# Altium footprint library amirlib.PcbLib: 456 footprints (part 8 of 29)
Each footprint in its own frame and in the unit in brackets; x right, y up, seen from the top. Pads: shape width x height; smd on the part's side, far side on the other; paste and mask are expansions set on the pad; w line width, h text height; cw(c..) or ccw(c..) is an arc to the next point about the centre after c.
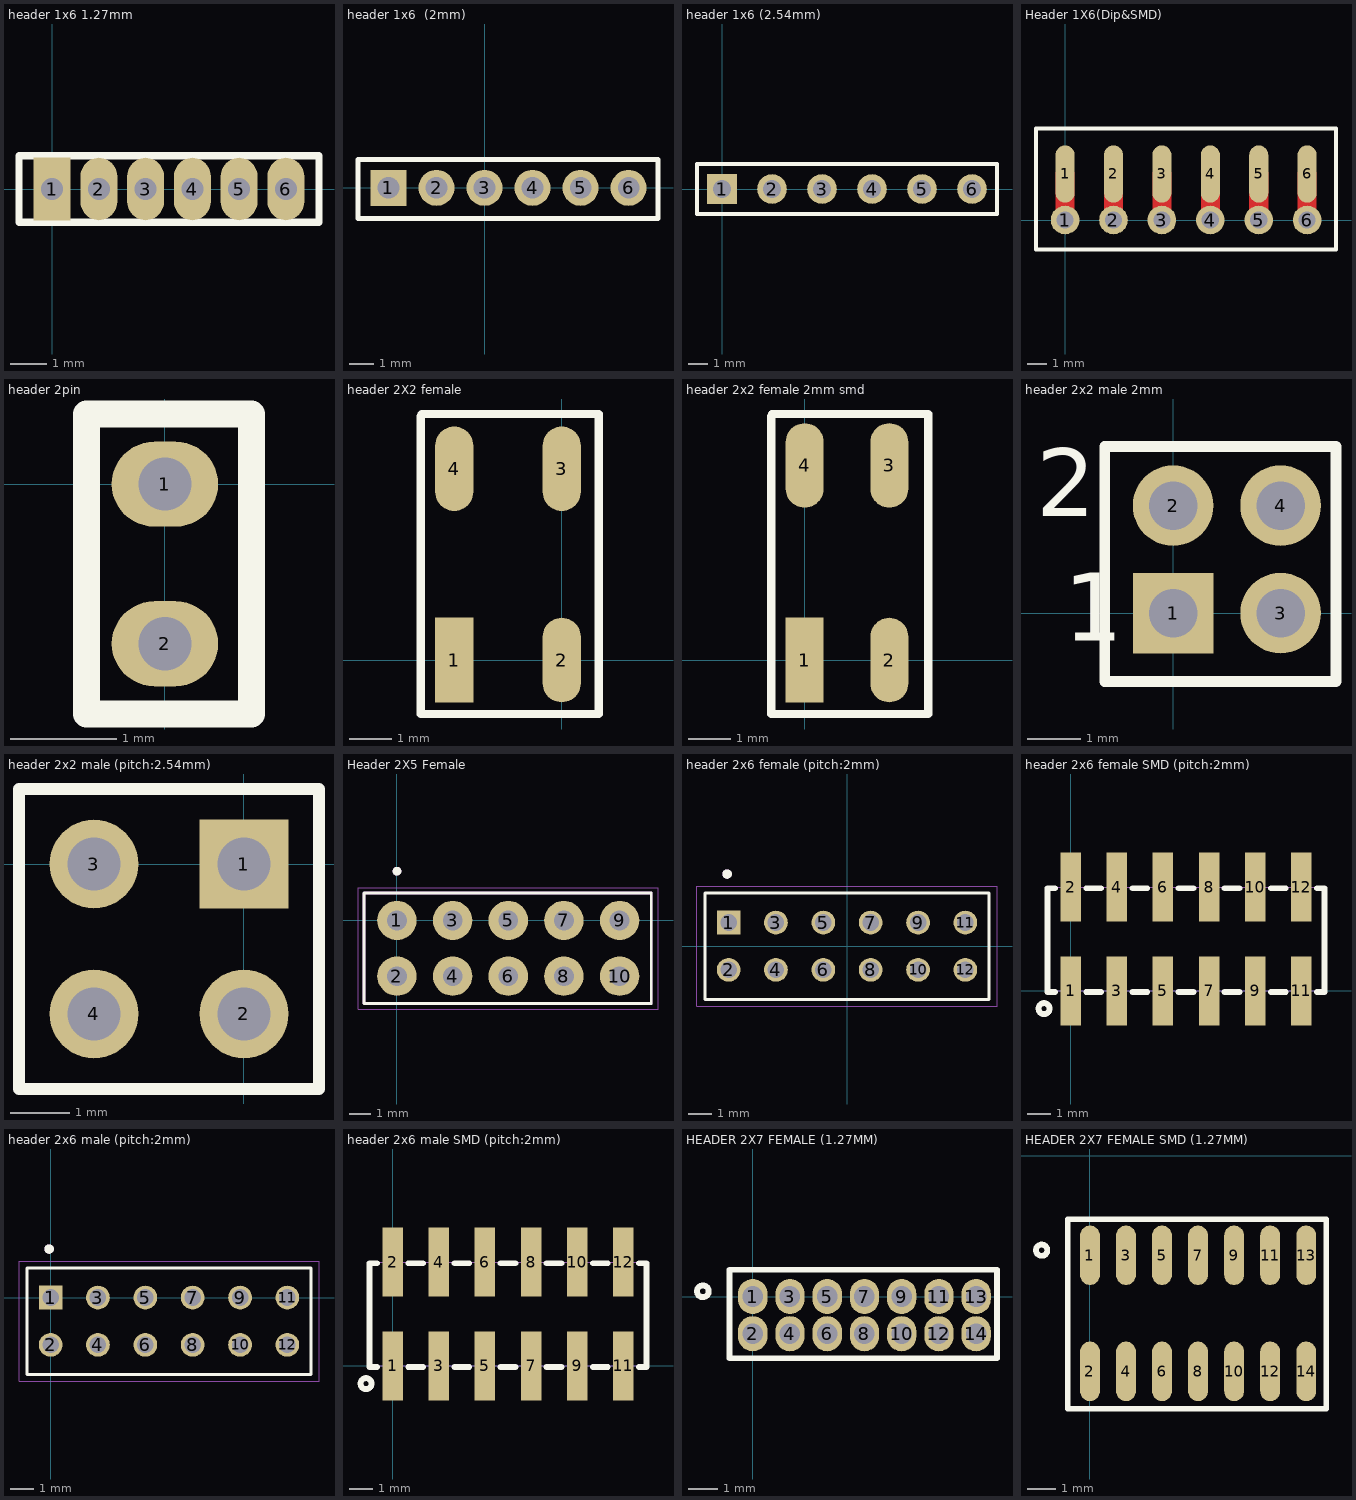
[diagram p7: the footprints below, top view; thin cyan lines are the x and y axes]

## header 1x6 1.27mm [mm]
pads (6):
  rect 1x1.7 hole 0.6: 1(0,0)
  oval 1x1.7 hole 0.6: 2(1.27,0) 3(2.54,0) 4(3.81,0) 5(5.08,0) 6(6.35,0)
Top Overlay:
  lines w0.2: -0.9,-0.9 7.25,-0.9 7.25,0.9 -0.9,0.9 -0.9,-0.9

## header 1x6  (2mm) [mm]
pads (6):
  rect 1.5x1.5 hole 0.9: 1(-4,0)
  round 1.5 hole 0.9: 2(-2,0) 3(0,0) 4(2,0) 5(4,0) 6(6,0)
Top Overlay:
  lines w0.2: -5.27,-1.27 -5.27,1.175 7.225,1.175 7.225,-1.27 -5.27,-1.27

## header 1x6 (2.54mm) [mm]
pads (6):
  rect 1.5x1.5 hole 0.9: 1(0,0)
  round 1.5 hole 0.9: 2(2.54,0) 3(5.08,0) 4(7.62,0) 5(10.16,0) 6(12.7,0)
Top Overlay:
  lines w0.2: -1.27,-1.27 -1.27,1.27 13.97,1.27 13.97,-1.27 -1.27,-1.27

## Header 1X6(Dip&SMD) [mm]
pads (12):
  round 1.5 hole 0.9: 1(0,0) 2(2.537,0) 3(5.075,0) 4(7.612,0) 5(10.149,0) 6(12.687,0)
  oval 1x3 smd: 1(0,2.413) 2(2.537,2.413) 3(5.075,2.413) 4(7.612,2.413) 5(10.149,2.413) 6(12.687,2.413)
Top Layer:
  lines w1: 0,0 0,2.413 ; 2.537,0 2.537,2.413 ; 5.075,0 5.075,2.413 ; 7.612,0 7.612,2.413 ; 10.149,0 10.149,2.413 ; 12.687,0 12.687,2.413
Top Overlay:
  lines w0.2: -1.524,-1.549 -1.524,4.8 14.2,4.8 14.2,-1.549 -1.524,-1.549

## header 2pin [mm]
pads (2):
  oval 1x0.8 hole 0.5 mask+0.05: 1(0,0) 2(0,-1.5)
Top Overlay:
  lines w0.254: -0.737,-2.16 0.813,-2.16 0.813,0.659 -0.737,0.659 -0.737,-2.16

## header 2X2 female [mm]
pads (4):
  rect 0.9x2 smd: 1(-2.54,0)
  oval 0.9x2 smd: 2(0,0) 3(0,4.521) 4(-2.54,4.521)
Top Overlay:
  lines w0.2: -3.327,5.766 -3.327,-1.275 0.879,-1.275 0.879,5.816 -3.312,5.816
3D body "User Library-1_27x1_27-SMD-female-2x2.STEP": height 4.5, standoff 0, extent -2.76,-0.15 0.16,4.45

## header 2x2 female 2mm smd [mm]
pads (4):
  rect 0.9x2 smd: 1(0,0)
  oval 0.9x2 smd: 2(2,0) 3(2,4.6) 4(0,4.6)
Top Overlay:
  lines w0.2: -0.787,5.766 -0.787,-1.275 2.925,-1.275 2.925,5.816 -0.772,5.816
3D body "User Library-1_27x1_27-SMD-female-2x2.STEP": height 4.5, standoff 0, extent -0.51,-0.125 2.41,4.475

## header 2x2 male 2mm [mm]
pads (4):
  rect 1.5x1.5 hole 0.9: 1(0,0)
  round 1.5 hole 0.9: 2(0,2) 3(2,0) 4(2,2)
Top Overlay:
  lines w0.2: 1.482,-1.27 3.03,-1.27 3.03,3.1 -1.27,3.1 -1.27,-1.27 2.993,-1.27 3.03,-1.233
  text "2" at -2.55,1.8 h1.27
  text "1" at -2.032,-0.508 h1.27

## header 2x2 male (pitch:2.54mm) [mm]
pads (4):
  rect 1.5x1.5 hole 0.9: 1(0,0)
  round 1.5 hole 0.9: 2(0,-2.54) 3(-2.54,0) 4(-2.54,-2.54)
Top Overlay:
  lines w0.2: -3.81,-3.81 1.27,-3.81 1.27,1.27 -3.81,1.27 -3.81,-3.81
3D body "Pin Header 2x2 TH Pitch 2.54mm.stp": height 9.5, standoff -3.2, extent -3.81,-3.81 1.27,1.27

## Header 2X5 Female [mm]
pads (10):
  round 1.8 / inner round 1.4 / far side oval 1.8x2.2 hole 0.9: 1(0,0) 2(0,-2.54) 3(2.54,0) 4(2.54,-2.54) 5(5.08,0) 6(5.08,-2.54) 7(7.62,0) 8(7.62,-2.54) 9(10.16,0) 10(10.16,-2.54)
Top Overlay:
  circle w0.2: c0,2.25 r0.1
  lines w0.127: -1.499,-3.79 11.608,-3.79 11.608,1.25 -1.499,1.25 -1.499,-3.79
Mechanical 13:
  circle w0.2: c0,2.25 r0.1
  lines w0.127: -1.499,-3.79 11.608,-3.79 11.608,1.25 -1.499,1.25 -1.499,-3.79
Mechanical 15:
  lines w0.05: -1.778,-4.04 11.913,-4.04 11.913,1.5 -1.778,1.5 -1.778,-4.04
3D body "User Library-Header 5X2.STEP": height 8.93, standoff -2.77, extent -1.52,-3.759 11.68,1.321

## header 2x6 female (pitch:2mm) [mm]
pads (12):
  rect 1x1 / inner round 1 / far side rect 1x1 hole 0.7: 1(-5,1)
  round 1 hole 0.7: 2(-5,-1) 3(-3,1) 4(-3,-1) 5(-1,1) 6(-1,-1) 7(1,1) 8(1,-1) 9(3,1) 10(3,-1) 11(5,1) 12(5,-1)
Top Overlay:
  circle w0.2: c-5.064,3.048 r0.1
  lines w0.127: -4,-2.25 6,-2.25 6,2.25 -4,2.25 ; 4,-2.25 -6,-2.25 -6,2.25 4,2.25
Bottom Overlay:
  lines w0.127: -6,-2.25 -6,2.25 6,2.25 6,-2.25 -6,-2.25
Mechanical 6:
  circle w0.2: c-5.064,3.048 r0.1
Mechanical 7:
  lines w0.05: -6.334,-2.54 6.334,-2.54 6.334,2.54 -6.334,2.54 -6.334,-2.54
3D body: height 4.5, standoff 0, extent -6,-2.25 6,2.25

## header 2x6 female SMD (pitch:2mm) [mm]
pads (12):
  rect 0.89x3 smd: 1(0,0) 2(0,4.5) 3(2,0) 4(2,4.5) 5(4,0) 6(4,4.5) 7(6,0) 8(6,4.5) 9(8,0) 10(8,4.5) 11(10,0) 12(10,4.5)
Top Overlay:
  circle w0.254: c-1.151,-0.767 r0.238
  lines w0.254: -0.676,-0.05 -1,-0.05 -1,4.45 -0.676,4.45 ; 0.676,-0.05 1.324,-0.05 ; 0.676,4.45 1.324,4.45 ; 2.676,-0.05 3.324,-0.05 ; 2.676,4.45 3.324,4.45 ; 4.676,-0.05 5.324,-0.05 ; 4.676,4.45 5.324,4.45 ; 6.676,-0.05 7.324,-0.05 ; 6.676,4.45 7.324,4.45 ; 8.676,-0.05 9.324,-0.05 ; 8.676,4.45 9.324,4.45 ; 10.676,-0.05 11,-0.05 11,0.254 ; 10.676,4.45 11,4.45 11,0.05
Mechanical 15:
  region: -1.06,-1 -1.06,-1.025 -1.025,-1.06 -0.975,-1.06 -0.94,-1.025 -0.94,-1 -0.94,-0.975 -0.975,-0.94 -1.025,-0.94 -1.06,-0.975
  lines w0.051: -1,0 -1,4.5 11,4.5 11,0 -1,0
3D body: height 4.3, standoff 0, extent -1,-0.05 11,4.5

## header 2x6 male (pitch:2mm) [mm]
pads (12):
  rect 1x1 / inner round 1 / far side rect 1x1 hole 0.7: 1(0,0)
  round 1 hole 0.7: 2(0,-2) 3(2,0) 4(2,-2) 5(4,0) 6(4,-2) 7(6,0) 8(6,-2) 9(8,0) 10(8,-2) 11(10,0) 12(10,-2)
Top Overlay:
  circle w0.2: c-0.064,2.048 r0.1
  lines w0.127: 1,-3.25 11,-3.25 11,1.25 1,1.25 ; 9,-3.25 -1,-3.25 -1,1.25 9,1.25
Bottom Overlay:
  lines w0.127: -1,-3.25 11,-3.25 11,1.25 -1,1.25 -1,-3.25
Mechanical 6:
  circle w0.2: c-0.064,2.048 r0.1
Mechanical 7:
  lines w0.05: -1.334,-3.54 -1.334,1.54 11.334,1.54 11.334,-3.54 -1.334,-3.54
3D body: height 4.5, standoff 0, extent -1,-3.25 11,1.25

## header 2x6 male SMD (pitch:2mm) [mm]
pads (12):
  rect 0.89x3 smd: 1(0,0) 2(0,4.5) 3(2,0) 4(2,4.5) 5(4,0) 6(4,4.5) 7(6,0) 8(6,4.5) 9(8,0) 10(8,4.5) 11(10,0) 12(10,4.5)
Top Overlay:
  circle w0.254: c-1.151,-0.767 r0.238
  lines w0.254: -0.676,-0.05 -1,-0.05 -1,4.45 -0.676,4.45 ; 0.676,-0.05 1.324,-0.05 ; 0.676,4.45 1.324,4.45 ; 2.676,-0.05 3.324,-0.05 ; 2.676,4.45 3.324,4.45 ; 4.676,-0.05 5.324,-0.05 ; 4.676,4.45 5.324,4.45 ; 6.676,-0.05 7.324,-0.05 ; 6.676,4.45 7.324,4.45 ; 8.676,-0.05 9.324,-0.05 ; 8.676,4.45 9.324,4.45 ; 10.676,-0.05 11,-0.05 11,0.254 ; 10.676,4.45 11,4.45 11,0.05
Mechanical 15:
  region: -1.06,-1 -1.06,-1.025 -1.025,-1.06 -0.975,-1.06 -0.94,-1.025 -0.94,-1 -0.94,-0.975 -0.975,-0.94 -1.025,-0.94 -1.06,-0.975
  lines w0.051: -1,0 11,0 11,4.5 -1,4.5 -1,0
3D body: height 4.3, standoff 0, extent -1,-0.05 11,4.5

## HEADER 2X7 FEMALE (1.27MM) [mm]
pads (14):
  oval 1x1.2 hole 0.7: 1(0,0) 2(0,-1.27) 3(1.27,0) 4(1.27,-1.27) 5(2.54,0) 6(2.54,-1.27) 7(3.81,0) 8(3.81,-1.27) 9(5.08,0) 10(5.08,-1.27) 11(6.35,0) 12(6.35,-1.27) 13(7.62,0) 14(7.62,-1.27)
Top Overlay:
  circle w0.2: c-1.702,0.178 r0.2
  lines w0.2: -0.787,0.892 -0.787,-2.108 8.331,-2.108 8.331,0.892 ; -0.787,0.914 8.331,0.914
3D body: height 4.3, standoff 0.3, extent -0.737,-2.007 8.331,0.889

## HEADER 2X7 FEMALE SMD (1.27MM) [mm]
pads (14):
  oval 0.7x2.1 smd: 1(0,-3.5) 2(0,-7.589) 3(1.27,-3.5) 4(1.27,-7.589) 5(2.54,-3.5) 6(2.54,-7.589) 7(3.81,-3.5) 8(3.81,-7.589) 9(5.08,-3.5) 10(5.08,-7.589) 11(6.35,-3.5) 12(6.35,-7.589) 13(7.62,-3.5) 14(7.62,-7.589)
Top Overlay:
  circle w0.2: c-1.702,-3.322 r0.2
  lines w0.2: -0.787,-8.91 -0.787,-2.23 8.331,-2.23 8.331,-8.91 -0.787,-8.91
3D body: height 4.3, standoff 0.3, extent -0.787,-7.787 8.331,-3.212